# Altium footprint library FootPrintLib_1.PcbLib: 498 footprints (part 26 of 35)
Each footprint in its own frame and in the unit in brackets; x right, y up, seen from the top. Pads: shape width x height; smd on the part's side, far side on the other; paste and mask are expansions set on the pad; w line width, h text height; cw(c..) or ccw(c..) is an arc to the next point about the centre after c.
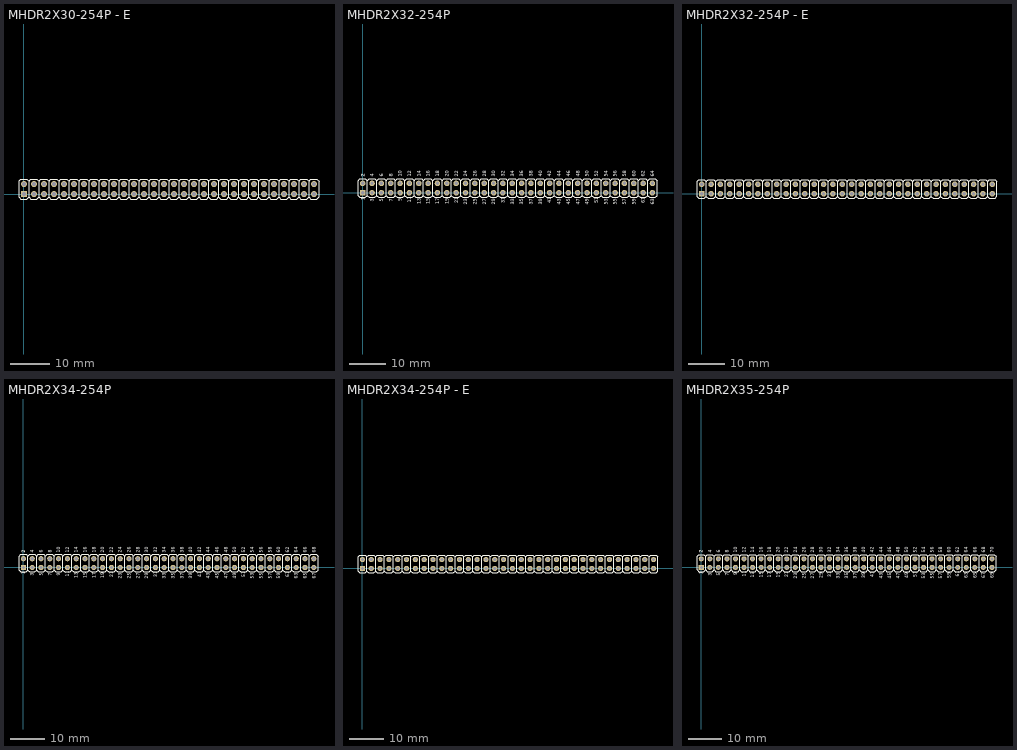
[diagram p25: the footprints below, top view; thin cyan lines are the x and y axes]

## MHDR2X30-254P - E [mm] "Male Header 2X30 with 2.54 mm Pitch"
pads (60):
  rect 1.5x1.5 hole 0.9: 1(0,0)
  round 1.5 hole 0.9: 2(0,2.54) 3(2.54,0) 4(2.54,2.54) 5(5.08,0) 6(5.08,2.54) 7(7.62,0) 8(7.62,2.54) 9(10.16,0) 10(10.16,2.54) 11(12.7,0) 12(12.7,2.54) 13(15.24,0) 14(15.24,2.54) 15(17.78,0) 16(17.78,2.54) 17(20.32,0) 18(20.32,2.54) 19(22.86,0) 20(22.86,2.54) 21(25.4,0) 22(25.4,2.54) 23(27.94,0) 24(27.94,2.54) 25(30.48,0) 26(30.48,2.54) 27(33.02,0) 28(33.02,2.54) 29(35.56,0) 30(35.56,2.54) 31(38.1,0) 32(38.1,2.54) 33(40.64,0) 34(40.64,2.54) 35(43.18,0) 36(43.18,2.54) 37(45.72,0) 38(45.72,2.54) 39(48.26,0) 40(48.26,2.54) 41(50.8,0) 42(50.8,2.54) 43(53.34,0) 44(53.34,2.54) 45(55.88,0) 46(55.88,2.54) 47(58.42,0) 48(58.42,2.54) 49(60.96,0) 50(60.96,2.54) 51(63.5,0) 52(63.5,2.54) 53(66.04,0) 54(66.04,2.54) 55(68.58,0) 56(68.58,2.54) 57(71.12,0) 58(71.12,2.54) 59(73.66,0) 60(73.66,2.54)
Top Overlay:
  drawing of 211 lines, arcs and shapes, not listed
3D body "PIN.STEP": height 8.43, standoff -2.49, extent 72.39,-1.27 74.93,1.27
3D body "PIN.STEP": height 8.43, standoff -2.49, extent 72.39,1.27 74.93,3.81
3D body "PIN.STEP": height 8.43, standoff -2.49, extent -1.27,1.27 1.27,3.81
3D body "PIN_mid.STEP": height 8.43, standoff -2.49, extent 69.85,-1.27 72.39,1.27
3D body "PIN_mid.STEP": height 8.43, standoff -2.49, extent 67.31,-1.27 69.85,1.27
3D body "PIN_mid.STEP": height 8.43, standoff -2.49, extent 64.77,-1.27 67.31,1.27
3D body "PIN_mid.STEP": height 8.43, standoff -2.49, extent 62.23,-1.27 64.77,1.27
3D body "PIN_mid.STEP": height 8.43, standoff -2.49, extent 59.69,-1.27 62.23,1.27
3D body "PIN_mid.STEP": height 8.43, standoff -2.49, extent 57.15,-1.27 59.69,1.27
3D body "PIN_mid.STEP": height 8.43, standoff -2.49, extent 54.61,-1.27 57.15,1.27
3D body "PIN_mid.STEP": height 8.43, standoff -2.49, extent 52.07,-1.27 54.61,1.27
3D body "PIN_mid.STEP": height 8.43, standoff -2.49, extent 49.53,-1.27 52.07,1.27
3D body "PIN_mid.STEP": height 8.43, standoff -2.49, extent 46.99,-1.27 49.53,1.27
3D body "PIN_mid.STEP": height 8.43, standoff -2.49, extent 44.45,-1.27 46.99,1.27
3D body "PIN_mid.STEP": height 8.43, standoff -2.49, extent 41.91,-1.27 44.45,1.27
3D body "PIN_mid.STEP": height 8.43, standoff -2.49, extent 39.37,-1.27 41.91,1.27
3D body "PIN_mid.STEP": height 8.43, standoff -2.49, extent 36.83,-1.27 39.37,1.27
3D body "PIN_mid.STEP": height 8.43, standoff -2.49, extent 34.29,-1.27 36.83,1.27
3D body "PIN_mid.STEP": height 8.43, standoff -2.49, extent 31.75,-1.27 34.29,1.27
3D body "PIN_mid.STEP": height 8.43, standoff -2.49, extent 29.21,-1.27 31.75,1.27
3D body "PIN_mid.STEP": height 8.43, standoff -2.49, extent 26.67,-1.27 29.21,1.27
3D body "PIN_mid.STEP": height 8.43, standoff -2.49, extent 24.13,-1.27 26.67,1.27
3D body "PIN_mid.STEP": height 8.43, standoff -2.49, extent 21.59,-1.27 24.13,1.27
3D body "PIN_mid.STEP": height 8.43, standoff -2.49, extent 19.05,-1.27 21.59,1.27
3D body "PIN_mid.STEP": height 8.43, standoff -2.49, extent 16.51,-1.27 19.05,1.27
3D body "PIN_mid.STEP": height 8.43, standoff -2.49, extent 13.97,-1.27 16.51,1.27
3D body "PIN_mid.STEP": height 8.43, standoff -2.49, extent 11.43,-1.27 13.97,1.27
3D body "PIN_mid.STEP": height 8.43, standoff -2.49, extent 8.89,-1.27 11.43,1.27
3D body "PIN_mid.STEP": height 8.43, standoff -2.49, extent 6.35,-1.27 8.89,1.27
3D body "PIN_mid.STEP": height 8.43, standoff -2.49, extent 3.81,-1.27 6.35,1.27
3D body "PIN_mid.STEP": height 8.43, standoff -2.49, extent 1.27,-1.27 3.81,1.27
3D body "PIN_mid.STEP": height 8.43, standoff -2.49, extent 1.27,1.27 3.81,3.81
3D body "PIN_mid.STEP": height 8.43, standoff -2.49, extent 69.85,1.27 72.39,3.81
3D body "PIN_mid.STEP": height 8.43, standoff -2.49, extent 67.31,1.27 69.85,3.81
3D body "PIN_mid.STEP": height 8.43, standoff -2.49, extent 64.77,1.27 67.31,3.81
3D body "PIN_mid.STEP": height 8.43, standoff -2.49, extent 62.23,1.27 64.77,3.81
3D body "PIN_mid.STEP": height 8.43, standoff -2.49, extent 59.69,1.27 62.23,3.81
3D body "PIN_mid.STEP": height 8.43, standoff -2.49, extent 57.15,1.27 59.69,3.81
3D body "PIN_mid.STEP": height 8.43, standoff -2.49, extent 54.61,1.27 57.15,3.81
3D body "PIN_mid.STEP": height 8.43, standoff -2.49, extent 52.07,1.27 54.61,3.81
3D body "PIN_mid.STEP": height 8.43, standoff -2.49, extent 49.53,1.27 52.07,3.81
3D body "PIN_mid.STEP": height 8.43, standoff -2.49, extent 46.99,1.27 49.53,3.81
3D body "PIN_mid.STEP": height 8.43, standoff -2.49, extent 44.45,1.27 46.99,3.81
3D body "PIN_mid.STEP": height 8.43, standoff -2.49, extent 41.91,1.27 44.45,3.81
3D body "PIN_mid.STEP": height 8.43, standoff -2.49, extent 39.37,1.27 41.91,3.81
3D body "PIN_mid.STEP": height 8.43, standoff -2.49, extent 36.83,1.27 39.37,3.81
3D body "PIN_mid.STEP": height 8.43, standoff -2.49, extent 34.29,1.27 36.83,3.81
3D body "PIN_mid.STEP": height 8.43, standoff -2.49, extent 31.75,1.27 34.29,3.81
3D body "PIN_mid.STEP": height 8.43, standoff -2.49, extent 29.21,1.27 31.75,3.81
3D body "PIN_mid.STEP": height 8.43, standoff -2.49, extent 26.67,1.27 29.21,3.81
3D body "PIN_mid.STEP": height 8.43, standoff -2.49, extent 24.13,1.27 26.67,3.81
3D body "PIN_mid.STEP": height 8.43, standoff -2.49, extent 21.59,1.27 24.13,3.81
3D body "PIN_mid.STEP": height 8.43, standoff -2.49, extent 19.05,1.27 21.59,3.81
3D body "PIN_mid.STEP": height 8.43, standoff -2.49, extent 16.51,1.27 19.05,3.81
3D body "PIN_mid.STEP": height 8.43, standoff -2.49, extent 13.97,1.27 16.51,3.81
3D body "PIN_mid.STEP": height 8.43, standoff -2.49, extent 11.43,1.27 13.97,3.81
3D body "PIN_mid.STEP": height 8.43, standoff -2.49, extent 8.89,1.27 11.43,3.81
3D body "PIN_mid.STEP": height 8.43, standoff -2.49, extent 6.35,1.27 8.89,3.81
3D body "PIN_mid.STEP": height 8.43, standoff -2.49, extent 3.81,1.27 6.35,3.81
3D body "PIN.STEP": height 8.43, standoff -2.49, extent -1.27,-1.27 1.27,1.27

## MHDR2X32-254P [mm] "Male Header 2X32 with 2.54 mm Pitch"
pads (64):
  rect 1.5x1.5 hole 0.9: 1(0,0)
  round 1.5 hole 0.9: 2(0,2.54) 3(2.54,0) 4(2.54,2.54) 5(5.08,0) 6(5.08,2.54) 7(7.62,0) 8(7.62,2.54) 9(10.16,0) 10(10.16,2.54) 11(12.7,0) 12(12.7,2.54) 13(15.24,0) 14(15.24,2.54) 15(17.78,0) 16(17.78,2.54) 17(20.32,0) 18(20.32,2.54) 19(22.86,0) 20(22.86,2.54) 21(25.4,0) 22(25.4,2.54) 23(27.94,0) 24(27.94,2.54) 25(30.48,0) 26(30.48,2.54) 27(33.02,0) 28(33.02,2.54) 29(35.56,0) 30(35.56,2.54) 31(38.1,0) 32(38.1,2.54) 33(40.64,0) 34(40.64,2.54) 35(43.18,0) 36(43.18,2.54) 37(45.72,0) 38(45.72,2.54) 39(48.26,0) 40(48.26,2.54) 41(50.8,0) 42(50.8,2.54) 43(53.34,0) 44(53.34,2.54) 45(55.88,0) 46(55.88,2.54) 47(58.42,0) 48(58.42,2.54) 49(60.96,0) 50(60.96,2.54) 51(63.5,0) 52(63.5,2.54) 53(66.04,0) 54(66.04,2.54) 55(68.58,0) 56(68.58,2.54) 57(71.12,0) 58(71.12,2.54) 59(73.66,0) 60(73.66,2.54) 61(76.2,0) 62(76.2,2.54) 63(78.74,0) 64(78.74,2.54)
Top Overlay:
  drawing of 225 lines, arcs and shapes, not listed
  text "63" at 79.248,-3.25 h1
  text "64" at 79.248,4.318 h1
  text "61" at 76.708,-2.821 h1
  text "62" at 76.708,4.318 h1
  text "59" at 74.168,-3.254 h1
  text "60" at 74.168,4.318 h1
  text "57" at 71.628,-3.302 h1
  text "58" at 71.628,4.318 h1
  text "55" at 69.088,-3.302 h1
  text "56" at 69.088,4.318 h1
  text "53" at 66.548,-3.302 h1
  text "54" at 66.548,4.318 h1
  text "51" at 64.008,-2.874 h1
  text "52" at 64.008,4.318 h1
  text "49" at 61.468,-3.254 h1
  text "50" at 61.468,4.318 h1
  text "47" at 58.928,-3.302 h1
  text "48" at 58.928,4.318 h1
  text "45" at 56.388,-3.302 h1
  text "46" at 56.388,4.318 h1
  text "43" at 53.848,-3.302 h1
  text "44" at 53.848,4.318 h1
  text "41" at 51.308,-2.874 h1
  text "42" at 51.308,4.318 h1
  text "39" at 48.768,-3.254 h1
  text "40" at 48.768,4.318 h1
  text "37" at 46.228,-3.302 h1
  text "38" at 46.228,4.318 h1
  text "35" at 43.688,-3.302 h1
  text "36" at 43.688,4.318 h1
  text "33" at 41.148,-3.302 h1
  text "34" at 41.148,4.318 h1
  text "31" at 38.608,-2.874 h1
  text "32" at 38.608,4.318 h1
  text "29" at 36.068,-3.254 h1
  text "30" at 36.068,4.318 h1
  text "27" at 33.528,-3.302 h1
  text "28" at 33.528,4.318 h1
  text "25" at 30.988,-3.302 h1
  text "26" at 30.988,4.318 h1
  text "23" at 28.448,-3.302 h1
  text "24" at 28.448,4.318 h1
  text "21" at 25.908,-2.874 h1
  text "22" at 25.908,4.318 h1
  text "19" at 23.368,-3.097 h1
  text "20" at 23.368,4.318 h1
  text "17" at 20.828,-3.145 h1
  text "18" at 20.828,4.318 h1
  text "15" at 18.288,-3.145 h1
  text "16" at 18.288,4.318 h1
  text "13" at 15.748,-3.145 h1
  text "14" at 15.748,4.318 h1
  text "11" at 13.208,-2.716 h1
  text "12" at 13.208,4.318 h1
  text "9" at 10.668,-2.364 h1
  text "10" at 10.668,4.318 h1
  text "7" at 8.128,-2.412 h1
  text "8" at 8.128,4.318 h1
  text "5" at 5.588,-2.412 h1
  text "6" at 5.588,4.318 h1
  text "3" at 3.048,-2.412 h1
  text "4" at 3.048,4.318 h1
  text "1" at 0.508,-1.983 h1
  text "2" at 0.508,4.318 h1
  text "2" at 0.508,4.318 h1
  text "1" at 0.508,-1.983 h1
3D body "PIN.STEP": height 8.43, standoff -2.49, extent 77.47,-1.27 80.01,1.27
3D body "PIN.STEP": height 8.43, standoff -2.49, extent 77.47,1.27 80.01,3.81
3D body "PIN.STEP": height 8.43, standoff -2.49, extent -1.27,1.27 1.27,3.81
3D body "PIN_mid.STEP": height 8.43, standoff -2.49, extent 74.93,-1.27 77.47,1.27
3D body "PIN_mid.STEP": height 8.43, standoff -2.49, extent 72.39,-1.27 74.93,1.27
3D body "PIN_mid.STEP": height 8.43, standoff -2.49, extent 69.85,-1.27 72.39,1.27
3D body "PIN_mid.STEP": height 8.43, standoff -2.49, extent 67.31,-1.27 69.85,1.27
3D body "PIN_mid.STEP": height 8.43, standoff -2.49, extent 64.77,-1.27 67.31,1.27
3D body "PIN_mid.STEP": height 8.43, standoff -2.49, extent 62.23,-1.27 64.77,1.27
3D body "PIN_mid.STEP": height 8.43, standoff -2.49, extent 59.69,-1.27 62.23,1.27
3D body "PIN_mid.STEP": height 8.43, standoff -2.49, extent 57.15,-1.27 59.69,1.27
3D body "PIN_mid.STEP": height 8.43, standoff -2.49, extent 54.61,-1.27 57.15,1.27
3D body "PIN_mid.STEP": height 8.43, standoff -2.49, extent 52.07,-1.27 54.61,1.27
3D body "PIN_mid.STEP": height 8.43, standoff -2.49, extent 49.53,-1.27 52.07,1.27
3D body "PIN_mid.STEP": height 8.43, standoff -2.49, extent 46.99,-1.27 49.53,1.27
3D body "PIN_mid.STEP": height 8.43, standoff -2.49, extent 44.45,-1.27 46.99,1.27
3D body "PIN_mid.STEP": height 8.43, standoff -2.49, extent 41.91,-1.27 44.45,1.27
3D body "PIN_mid.STEP": height 8.43, standoff -2.49, extent 39.37,-1.27 41.91,1.27
3D body "PIN_mid.STEP": height 8.43, standoff -2.49, extent 36.83,-1.27 39.37,1.27
3D body "PIN_mid.STEP": height 8.43, standoff -2.49, extent 34.29,-1.27 36.83,1.27
3D body "PIN_mid.STEP": height 8.43, standoff -2.49, extent 31.75,-1.27 34.29,1.27
3D body "PIN_mid.STEP": height 8.43, standoff -2.49, extent 29.21,-1.27 31.75,1.27
3D body "PIN_mid.STEP": height 8.43, standoff -2.49, extent 26.67,-1.27 29.21,1.27
3D body "PIN_mid.STEP": height 8.43, standoff -2.49, extent 24.13,-1.27 26.67,1.27
3D body "PIN_mid.STEP": height 8.43, standoff -2.49, extent 21.59,-1.27 24.13,1.27
3D body "PIN_mid.STEP": height 8.43, standoff -2.49, extent 19.05,-1.27 21.59,1.27
3D body "PIN_mid.STEP": height 8.43, standoff -2.49, extent 16.51,-1.27 19.05,1.27
3D body "PIN_mid.STEP": height 8.43, standoff -2.49, extent 13.97,-1.27 16.51,1.27
3D body "PIN_mid.STEP": height 8.43, standoff -2.49, extent 11.43,-1.27 13.97,1.27
3D body "PIN_mid.STEP": height 8.43, standoff -2.49, extent 8.89,-1.27 11.43,1.27
3D body "PIN_mid.STEP": height 8.43, standoff -2.49, extent 6.35,-1.27 8.89,1.27
3D body "PIN_mid.STEP": height 8.43, standoff -2.49, extent 3.81,-1.27 6.35,1.27
3D body "PIN_mid.STEP": height 8.43, standoff -2.49, extent 1.27,-1.27 3.81,1.27
3D body "PIN_mid.STEP": height 8.43, standoff -2.49, extent 1.27,1.27 3.81,3.81
3D body "PIN_mid.STEP": height 8.43, standoff -2.49, extent 74.93,1.27 77.47,3.81
3D body "PIN_mid.STEP": height 8.43, standoff -2.49, extent 72.39,1.27 74.93,3.81
3D body "PIN_mid.STEP": height 8.43, standoff -2.49, extent 69.85,1.27 72.39,3.81
3D body "PIN_mid.STEP": height 8.43, standoff -2.49, extent 67.31,1.27 69.85,3.81
3D body "PIN_mid.STEP": height 8.43, standoff -2.49, extent 64.77,1.27 67.31,3.81
3D body "PIN_mid.STEP": height 8.43, standoff -2.49, extent 62.23,1.27 64.77,3.81
3D body "PIN_mid.STEP": height 8.43, standoff -2.49, extent 59.69,1.27 62.23,3.81
3D body "PIN_mid.STEP": height 8.43, standoff -2.49, extent 57.15,1.27 59.69,3.81
3D body "PIN_mid.STEP": height 8.43, standoff -2.49, extent 54.61,1.27 57.15,3.81
3D body "PIN_mid.STEP": height 8.43, standoff -2.49, extent 52.07,1.27 54.61,3.81
3D body "PIN_mid.STEP": height 8.43, standoff -2.49, extent 49.53,1.27 52.07,3.81
3D body "PIN_mid.STEP": height 8.43, standoff -2.49, extent 46.99,1.27 49.53,3.81
3D body "PIN_mid.STEP": height 8.43, standoff -2.49, extent 44.45,1.27 46.99,3.81
3D body "PIN_mid.STEP": height 8.43, standoff -2.49, extent 41.91,1.27 44.45,3.81
3D body "PIN_mid.STEP": height 8.43, standoff -2.49, extent 39.37,1.27 41.91,3.81
3D body "PIN_mid.STEP": height 8.43, standoff -2.49, extent 36.83,1.27 39.37,3.81
3D body "PIN_mid.STEP": height 8.43, standoff -2.49, extent 34.29,1.27 36.83,3.81
3D body "PIN_mid.STEP": height 8.43, standoff -2.49, extent 31.75,1.27 34.29,3.81
3D body "PIN_mid.STEP": height 8.43, standoff -2.49, extent 29.21,1.27 31.75,3.81
3D body "PIN_mid.STEP": height 8.43, standoff -2.49, extent 26.67,1.27 29.21,3.81
3D body "PIN_mid.STEP": height 8.43, standoff -2.49, extent 24.13,1.27 26.67,3.81
3D body "PIN_mid.STEP": height 8.43, standoff -2.49, extent 21.59,1.27 24.13,3.81
3D body "PIN_mid.STEP": height 8.43, standoff -2.49, extent 19.05,1.27 21.59,3.81
3D body "PIN_mid.STEP": height 8.43, standoff -2.49, extent 16.51,1.27 19.05,3.81
3D body "PIN_mid.STEP": height 8.43, standoff -2.49, extent 13.97,1.27 16.51,3.81
3D body "PIN_mid.STEP": height 8.43, standoff -2.49, extent 11.43,1.27 13.97,3.81
3D body "PIN_mid.STEP": height 8.43, standoff -2.49, extent 8.89,1.27 11.43,3.81
3D body "PIN_mid.STEP": height 8.43, standoff -2.49, extent 6.35,1.27 8.89,3.81
3D body "PIN_mid.STEP": height 8.43, standoff -2.49, extent 3.81,1.27 6.35,3.81
3D body "PIN.STEP": height 8.43, standoff -2.49, extent -1.27,-1.27 1.27,1.27

## MHDR2X32-254P - E [mm] "Male Header 2X32 with 2.54 mm Pitch"
pads (64):
  rect 1.5x1.5 hole 0.9: 1(0,0)
  round 1.5 hole 0.9: 2(0,2.54) 3(2.54,0) 4(2.54,2.54) 5(5.08,0) 6(5.08,2.54) 7(7.62,0) 8(7.62,2.54) 9(10.16,0) 10(10.16,2.54) 11(12.7,0) 12(12.7,2.54) 13(15.24,0) 14(15.24,2.54) 15(17.78,0) 16(17.78,2.54) 17(20.32,0) 18(20.32,2.54) 19(22.86,0) 20(22.86,2.54) 21(25.4,0) 22(25.4,2.54) 23(27.94,0) 24(27.94,2.54) 25(30.48,0) 26(30.48,2.54) 27(33.02,0) 28(33.02,2.54) 29(35.56,0) 30(35.56,2.54) 31(38.1,0) 32(38.1,2.54) 33(40.64,0) 34(40.64,2.54) 35(43.18,0) 36(43.18,2.54) 37(45.72,0) 38(45.72,2.54) 39(48.26,0) 40(48.26,2.54) 41(50.8,0) 42(50.8,2.54) 43(53.34,0) 44(53.34,2.54) 45(55.88,0) 46(55.88,2.54) 47(58.42,0) 48(58.42,2.54) 49(60.96,0) 50(60.96,2.54) 51(63.5,0) 52(63.5,2.54) 53(66.04,0) 54(66.04,2.54) 55(68.58,0) 56(68.58,2.54) 57(71.12,0) 58(71.12,2.54) 59(73.66,0) 60(73.66,2.54) 61(76.2,0) 62(76.2,2.54) 63(78.74,0) 64(78.74,2.54)
Top Overlay:
  drawing of 225 lines, arcs and shapes, not listed
3D body "PIN.STEP": height 8.43, standoff -2.49, extent -1.27,-1.27 1.27,1.27
3D body "PIN_mid.STEP": height 8.43, standoff -2.49, extent 3.81,1.27 6.35,3.81
3D body "PIN_mid.STEP": height 8.43, standoff -2.49, extent 6.35,1.27 8.89,3.81
3D body "PIN_mid.STEP": height 8.43, standoff -2.49, extent 8.89,1.27 11.43,3.81
3D body "PIN_mid.STEP": height 8.43, standoff -2.49, extent 11.43,1.27 13.97,3.81
3D body "PIN_mid.STEP": height 8.43, standoff -2.49, extent 13.97,1.27 16.51,3.81
3D body "PIN_mid.STEP": height 8.43, standoff -2.49, extent 16.51,1.27 19.05,3.81
3D body "PIN_mid.STEP": height 8.43, standoff -2.49, extent 19.05,1.27 21.59,3.81
3D body "PIN_mid.STEP": height 8.43, standoff -2.49, extent 21.59,1.27 24.13,3.81
3D body "PIN_mid.STEP": height 8.43, standoff -2.49, extent 24.13,1.27 26.67,3.81
3D body "PIN_mid.STEP": height 8.43, standoff -2.49, extent 26.67,1.27 29.21,3.81
3D body "PIN_mid.STEP": height 8.43, standoff -2.49, extent 29.21,1.27 31.75,3.81
3D body "PIN_mid.STEP": height 8.43, standoff -2.49, extent 31.75,1.27 34.29,3.81
3D body "PIN_mid.STEP": height 8.43, standoff -2.49, extent 34.29,1.27 36.83,3.81
3D body "PIN_mid.STEP": height 8.43, standoff -2.49, extent 36.83,1.27 39.37,3.81
3D body "PIN_mid.STEP": height 8.43, standoff -2.49, extent 39.37,1.27 41.91,3.81
3D body "PIN_mid.STEP": height 8.43, standoff -2.49, extent 41.91,1.27 44.45,3.81
3D body "PIN_mid.STEP": height 8.43, standoff -2.49, extent 44.45,1.27 46.99,3.81
3D body "PIN_mid.STEP": height 8.43, standoff -2.49, extent 46.99,1.27 49.53,3.81
3D body "PIN_mid.STEP": height 8.43, standoff -2.49, extent 49.53,1.27 52.07,3.81
3D body "PIN_mid.STEP": height 8.43, standoff -2.49, extent 52.07,1.27 54.61,3.81
3D body "PIN_mid.STEP": height 8.43, standoff -2.49, extent 54.61,1.27 57.15,3.81
3D body "PIN_mid.STEP": height 8.43, standoff -2.49, extent 57.15,1.27 59.69,3.81
3D body "PIN_mid.STEP": height 8.43, standoff -2.49, extent 59.69,1.27 62.23,3.81
3D body "PIN_mid.STEP": height 8.43, standoff -2.49, extent 62.23,1.27 64.77,3.81
3D body "PIN_mid.STEP": height 8.43, standoff -2.49, extent 64.77,1.27 67.31,3.81
3D body "PIN_mid.STEP": height 8.43, standoff -2.49, extent 67.31,1.27 69.85,3.81
3D body "PIN_mid.STEP": height 8.43, standoff -2.49, extent 69.85,1.27 72.39,3.81
3D body "PIN_mid.STEP": height 8.43, standoff -2.49, extent 72.39,1.27 74.93,3.81
3D body "PIN_mid.STEP": height 8.43, standoff -2.49, extent 74.93,1.27 77.47,3.81
3D body "PIN_mid.STEP": height 8.43, standoff -2.49, extent 1.27,1.27 3.81,3.81
3D body "PIN_mid.STEP": height 8.43, standoff -2.49, extent 1.27,-1.27 3.81,1.27
3D body "PIN_mid.STEP": height 8.43, standoff -2.49, extent 3.81,-1.27 6.35,1.27
3D body "PIN_mid.STEP": height 8.43, standoff -2.49, extent 6.35,-1.27 8.89,1.27
3D body "PIN_mid.STEP": height 8.43, standoff -2.49, extent 8.89,-1.27 11.43,1.27
3D body "PIN_mid.STEP": height 8.43, standoff -2.49, extent 11.43,-1.27 13.97,1.27
3D body "PIN_mid.STEP": height 8.43, standoff -2.49, extent 13.97,-1.27 16.51,1.27
3D body "PIN_mid.STEP": height 8.43, standoff -2.49, extent 16.51,-1.27 19.05,1.27
3D body "PIN_mid.STEP": height 8.43, standoff -2.49, extent 19.05,-1.27 21.59,1.27
3D body "PIN_mid.STEP": height 8.43, standoff -2.49, extent 21.59,-1.27 24.13,1.27
3D body "PIN_mid.STEP": height 8.43, standoff -2.49, extent 24.13,-1.27 26.67,1.27
3D body "PIN_mid.STEP": height 8.43, standoff -2.49, extent 26.67,-1.27 29.21,1.27
3D body "PIN_mid.STEP": height 8.43, standoff -2.49, extent 29.21,-1.27 31.75,1.27
3D body "PIN_mid.STEP": height 8.43, standoff -2.49, extent 31.75,-1.27 34.29,1.27
3D body "PIN_mid.STEP": height 8.43, standoff -2.49, extent 34.29,-1.27 36.83,1.27
3D body "PIN_mid.STEP": height 8.43, standoff -2.49, extent 36.83,-1.27 39.37,1.27
3D body "PIN_mid.STEP": height 8.43, standoff -2.49, extent 39.37,-1.27 41.91,1.27
3D body "PIN_mid.STEP": height 8.43, standoff -2.49, extent 41.91,-1.27 44.45,1.27
3D body "PIN_mid.STEP": height 8.43, standoff -2.49, extent 44.45,-1.27 46.99,1.27
3D body "PIN_mid.STEP": height 8.43, standoff -2.49, extent 46.99,-1.27 49.53,1.27
3D body "PIN_mid.STEP": height 8.43, standoff -2.49, extent 49.53,-1.27 52.07,1.27
3D body "PIN_mid.STEP": height 8.43, standoff -2.49, extent 52.07,-1.27 54.61,1.27
3D body "PIN_mid.STEP": height 8.43, standoff -2.49, extent 54.61,-1.27 57.15,1.27
3D body "PIN_mid.STEP": height 8.43, standoff -2.49, extent 57.15,-1.27 59.69,1.27
3D body "PIN_mid.STEP": height 8.43, standoff -2.49, extent 59.69,-1.27 62.23,1.27
3D body "PIN_mid.STEP": height 8.43, standoff -2.49, extent 62.23,-1.27 64.77,1.27
3D body "PIN_mid.STEP": height 8.43, standoff -2.49, extent 64.77,-1.27 67.31,1.27
3D body "PIN_mid.STEP": height 8.43, standoff -2.49, extent 67.31,-1.27 69.85,1.27
3D body "PIN_mid.STEP": height 8.43, standoff -2.49, extent 69.85,-1.27 72.39,1.27
3D body "PIN_mid.STEP": height 8.43, standoff -2.49, extent 72.39,-1.27 74.93,1.27
3D body "PIN_mid.STEP": height 8.43, standoff -2.49, extent 74.93,-1.27 77.47,1.27
3D body "PIN.STEP": height 8.43, standoff -2.49, extent -1.27,1.27 1.27,3.81
3D body "PIN.STEP": height 8.43, standoff -2.49, extent 77.47,1.27 80.01,3.81
3D body "PIN.STEP": height 8.43, standoff -2.49, extent 77.47,-1.27 80.01,1.27

## MHDR2X34-254P [mm] "Male Header 2X34 with 2.54 mm Pitch"
pads (68):
  rect 1.5x1.5 hole 0.9: 1(0,0)
  round 1.5 hole 0.9: 2(0,2.54) 3(2.54,0) 4(2.54,2.54) 5(5.08,0) 6(5.08,2.54) 7(7.62,0) 8(7.62,2.54) 9(10.16,0) 10(10.16,2.54) 11(12.7,0) 12(12.7,2.54) 13(15.24,0) 14(15.24,2.54) 15(17.78,0) 16(17.78,2.54) 17(20.32,0) 18(20.32,2.54) 19(22.86,0) 20(22.86,2.54) 21(25.4,0) 22(25.4,2.54) 23(27.94,0) 24(27.94,2.54) 25(30.48,0) 26(30.48,2.54) 27(33.02,0) 28(33.02,2.54) 29(35.56,0) 30(35.56,2.54) 31(38.1,0) 32(38.1,2.54) 33(40.64,0) 34(40.64,2.54) 35(43.18,0) 36(43.18,2.54) 37(45.72,0) 38(45.72,2.54) 39(48.26,0) 40(48.26,2.54) 41(50.8,0) 42(50.8,2.54) 43(53.34,0) 44(53.34,2.54) 45(55.88,0) 46(55.88,2.54) 47(58.42,0) 48(58.42,2.54) 49(60.96,0) 50(60.96,2.54) 51(63.5,0) 52(63.5,2.54) 53(66.04,0) 54(66.04,2.54) 55(68.58,0) 56(68.58,2.54) 57(71.12,0) 58(71.12,2.54) 59(73.66,0) 60(73.66,2.54) 61(76.2,0) 62(76.2,2.54) 63(78.74,0) 64(78.74,2.54) 65(81.28,0) 66(81.28,2.54) 67(83.82,0) 68(83.82,2.54)
Top Overlay:
  drawing of 239 lines, arcs and shapes, not listed
  text "1" at 0.508,-1.983 h1
  text "2" at 0.508,4.318 h1
  text "2" at 0.508,4.318 h1
  text "1" at 0.508,-1.983 h1
  text "4" at 3.048,4.318 h1
  text "3" at 3.048,-2.412 h1
  text "6" at 5.588,4.318 h1
  text "5" at 5.588,-2.412 h1
  text "8" at 8.128,4.318 h1
  text "7" at 8.128,-2.412 h1
  text "10" at 10.668,4.318 h1
  text "9" at 10.668,-2.364 h1
  text "12" at 13.208,4.318 h1
  text "11" at 13.208,-2.716 h1
  text "14" at 15.748,4.318 h1
  text "13" at 15.748,-3.145 h1
  text "16" at 18.288,4.318 h1
  text "15" at 18.288,-3.145 h1
  text "18" at 20.828,4.318 h1
  text "17" at 20.828,-3.145 h1
  text "20" at 23.368,4.318 h1
  text "19" at 23.368,-3.097 h1
  text "22" at 25.908,4.318 h1
  text "21" at 25.908,-2.874 h1
  text "24" at 28.448,4.318 h1
  text "23" at 28.448,-3.302 h1
  text "26" at 30.988,4.318 h1
  text "25" at 30.988,-3.302 h1
  text "28" at 33.528,4.318 h1
  text "27" at 33.528,-3.302 h1
  text "30" at 36.068,4.318 h1
  text "29" at 36.068,-3.254 h1
  text "32" at 38.608,4.318 h1
  text "31" at 38.608,-2.874 h1
  text "34" at 41.148,4.318 h1
  text "33" at 41.148,-3.302 h1
  text "36" at 43.688,4.318 h1
  text "35" at 43.688,-3.302 h1
  text "38" at 46.228,4.318 h1
  text "37" at 46.228,-3.302 h1
  text "40" at 48.768,4.318 h1
  text "39" at 48.768,-3.254 h1
  text "42" at 51.308,4.318 h1
  text "41" at 51.308,-2.874 h1
  text "44" at 53.848,4.318 h1
  text "43" at 53.848,-3.302 h1
  text "46" at 56.388,4.318 h1
  text "45" at 56.388,-3.302 h1
  text "48" at 58.928,4.318 h1
  text "47" at 58.928,-3.302 h1
  text "50" at 61.468,4.318 h1
  text "49" at 61.468,-3.254 h1
  text "52" at 64.008,4.318 h1
  text "51" at 64.008,-2.874 h1
  text "54" at 66.548,4.318 h1
  text "53" at 66.548,-3.302 h1
  text "56" at 69.088,4.318 h1
  text "55" at 69.088,-3.302 h1
  text "58" at 71.628,4.318 h1
  text "57" at 71.628,-3.302 h1
  text "60" at 74.168,4.318 h1
  text "59" at 74.168,-3.254 h1
  text "62" at 76.708,4.318 h1
  text "61" at 76.708,-2.821 h1
  text "64" at 79.248,4.318 h1
  text "63" at 79.248,-3.25 h1
  text "66" at 81.788,4.318 h1
  text "65" at 81.788,-3.25 h1
  text "68" at 84.328,4.318 h1
  text "67" at 84.328,-3.25 h1
3D body "PIN.STEP": height 8.43, standoff -2.49, extent 82.55,-1.27 85.09,1.27
3D body "PIN.STEP": height 8.43, standoff -2.49, extent 82.55,1.27 85.09,3.81
3D body "PIN.STEP": height 8.43, standoff -2.49, extent -1.27,1.27 1.27,3.81
3D body "PIN_mid.STEP": height 8.43, standoff -2.49, extent 80.01,-1.27 82.55,1.27
3D body "PIN_mid.STEP": height 8.43, standoff -2.49, extent 77.47,-1.27 80.01,1.27
3D body "PIN_mid.STEP": height 8.43, standoff -2.49, extent 74.93,-1.27 77.47,1.27
3D body "PIN_mid.STEP": height 8.43, standoff -2.49, extent 72.39,-1.27 74.93,1.27
3D body "PIN_mid.STEP": height 8.43, standoff -2.49, extent 69.85,-1.27 72.39,1.27
3D body "PIN_mid.STEP": height 8.43, standoff -2.49, extent 67.31,-1.27 69.85,1.27
3D body "PIN_mid.STEP": height 8.43, standoff -2.49, extent 64.77,-1.27 67.31,1.27
3D body "PIN_mid.STEP": height 8.43, standoff -2.49, extent 62.23,-1.27 64.77,1.27
3D body "PIN_mid.STEP": height 8.43, standoff -2.49, extent 59.69,-1.27 62.23,1.27
3D body "PIN_mid.STEP": height 8.43, standoff -2.49, extent 57.15,-1.27 59.69,1.27
3D body "PIN_mid.STEP": height 8.43, standoff -2.49, extent 54.61,-1.27 57.15,1.27
3D body "PIN_mid.STEP": height 8.43, standoff -2.49, extent 52.07,-1.27 54.61,1.27
3D body "PIN_mid.STEP": height 8.43, standoff -2.49, extent 49.53,-1.27 52.07,1.27
3D body "PIN_mid.STEP": height 8.43, standoff -2.49, extent 46.99,-1.27 49.53,1.27
3D body "PIN_mid.STEP": height 8.43, standoff -2.49, extent 44.45,-1.27 46.99,1.27
3D body "PIN_mid.STEP": height 8.43, standoff -2.49, extent 41.91,-1.27 44.45,1.27
3D body "PIN_mid.STEP": height 8.43, standoff -2.49, extent 39.37,-1.27 41.91,1.27
3D body "PIN_mid.STEP": height 8.43, standoff -2.49, extent 36.83,-1.27 39.37,1.27
3D body "PIN_mid.STEP": height 8.43, standoff -2.49, extent 34.29,-1.27 36.83,1.27
3D body "PIN_mid.STEP": height 8.43, standoff -2.49, extent 31.75,-1.27 34.29,1.27
3D body "PIN_mid.STEP": height 8.43, standoff -2.49, extent 29.21,-1.27 31.75,1.27
3D body "PIN_mid.STEP": height 8.43, standoff -2.49, extent 26.67,-1.27 29.21,1.27
3D body "PIN_mid.STEP": height 8.43, standoff -2.49, extent 24.13,-1.27 26.67,1.27
3D body "PIN_mid.STEP": height 8.43, standoff -2.49, extent 21.59,-1.27 24.13,1.27
3D body "PIN_mid.STEP": height 8.43, standoff -2.49, extent 19.05,-1.27 21.59,1.27
3D body "PIN_mid.STEP": height 8.43, standoff -2.49, extent 16.51,-1.27 19.05,1.27
3D body "PIN_mid.STEP": height 8.43, standoff -2.49, extent 13.97,-1.27 16.51,1.27
3D body "PIN_mid.STEP": height 8.43, standoff -2.49, extent 11.43,-1.27 13.97,1.27
3D body "PIN_mid.STEP": height 8.43, standoff -2.49, extent 8.89,-1.27 11.43,1.27
3D body "PIN_mid.STEP": height 8.43, standoff -2.49, extent 6.35,-1.27 8.89,1.27
3D body "PIN_mid.STEP": height 8.43, standoff -2.49, extent 3.81,-1.27 6.35,1.27
3D body "PIN_mid.STEP": height 8.43, standoff -2.49, extent 1.27,-1.27 3.81,1.27
3D body "PIN_mid.STEP": height 8.43, standoff -2.49, extent 1.27,1.27 3.81,3.81
3D body "PIN_mid.STEP": height 8.43, standoff -2.49, extent 80.01,1.27 82.55,3.81
3D body "PIN_mid.STEP": height 8.43, standoff -2.49, extent 77.47,1.27 80.01,3.81
3D body "PIN_mid.STEP": height 8.43, standoff -2.49, extent 74.93,1.27 77.47,3.81
3D body "PIN_mid.STEP": height 8.43, standoff -2.49, extent 72.39,1.27 74.93,3.81
3D body "PIN_mid.STEP": height 8.43, standoff -2.49, extent 69.85,1.27 72.39,3.81
3D body "PIN_mid.STEP": height 8.43, standoff -2.49, extent 67.31,1.27 69.85,3.81
3D body "PIN_mid.STEP": height 8.43, standoff -2.49, extent 64.77,1.27 67.31,3.81
3D body "PIN_mid.STEP": height 8.43, standoff -2.49, extent 62.23,1.27 64.77,3.81
3D body "PIN_mid.STEP": height 8.43, standoff -2.49, extent 59.69,1.27 62.23,3.81
3D body "PIN_mid.STEP": height 8.43, standoff -2.49, extent 57.15,1.27 59.69,3.81
3D body "PIN_mid.STEP": height 8.43, standoff -2.49, extent 54.61,1.27 57.15,3.81
3D body "PIN_mid.STEP": height 8.43, standoff -2.49, extent 52.07,1.27 54.61,3.81
3D body "PIN_mid.STEP": height 8.43, standoff -2.49, extent 49.53,1.27 52.07,3.81
3D body "PIN_mid.STEP": height 8.43, standoff -2.49, extent 46.99,1.27 49.53,3.81
3D body "PIN_mid.STEP": height 8.43, standoff -2.49, extent 44.45,1.27 46.99,3.81
3D body "PIN_mid.STEP": height 8.43, standoff -2.49, extent 41.91,1.27 44.45,3.81
3D body "PIN_mid.STEP": height 8.43, standoff -2.49, extent 39.37,1.27 41.91,3.81
3D body "PIN_mid.STEP": height 8.43, standoff -2.49, extent 36.83,1.27 39.37,3.81
3D body "PIN_mid.STEP": height 8.43, standoff -2.49, extent 34.29,1.27 36.83,3.81
3D body "PIN_mid.STEP": height 8.43, standoff -2.49, extent 31.75,1.27 34.29,3.81
3D body "PIN_mid.STEP": height 8.43, standoff -2.49, extent 29.21,1.27 31.75,3.81
3D body "PIN_mid.STEP": height 8.43, standoff -2.49, extent 26.67,1.27 29.21,3.81
3D body "PIN_mid.STEP": height 8.43, standoff -2.49, extent 24.13,1.27 26.67,3.81
3D body "PIN_mid.STEP": height 8.43, standoff -2.49, extent 21.59,1.27 24.13,3.81
3D body "PIN_mid.STEP": height 8.43, standoff -2.49, extent 19.05,1.27 21.59,3.81
3D body "PIN_mid.STEP": height 8.43, standoff -2.49, extent 16.51,1.27 19.05,3.81
3D body "PIN_mid.STEP": height 8.43, standoff -2.49, extent 13.97,1.27 16.51,3.81
3D body "PIN_mid.STEP": height 8.43, standoff -2.49, extent 11.43,1.27 13.97,3.81
3D body "PIN_mid.STEP": height 8.43, standoff -2.49, extent 8.89,1.27 11.43,3.81
3D body "PIN_mid.STEP": height 8.43, standoff -2.49, extent 6.35,1.27 8.89,3.81
3D body "PIN_mid.STEP": height 8.43, standoff -2.49, extent 3.81,1.27 6.35,3.81
3D body "PIN.STEP": height 8.43, standoff -2.49, extent -1.27,-1.27 1.27,1.27

## MHDR2X34-254P - E [mm] "Male Header 2X34 with 2.54 mm Pitch"
pads (68):
  rect 1.5x1.5 hole 0.9: 1(0,0)
  round 1.5 hole 0.9: 2(0,2.54) 3(2.54,0) 4(2.54,2.54) 5(5.08,0) 6(5.08,2.54) 7(7.62,0) 8(7.62,2.54) 9(10.16,0) 10(10.16,2.54) 11(12.7,0) 12(12.7,2.54) 13(15.24,0) 14(15.24,2.54) 15(17.78,0) 16(17.78,2.54) 17(20.32,0) 18(20.32,2.54) 19(22.86,0) 20(22.86,2.54) 21(25.4,0) 22(25.4,2.54) 23(27.94,0) 24(27.94,2.54) 25(30.48,0) 26(30.48,2.54) 27(33.02,0) 28(33.02,2.54) 29(35.56,0) 30(35.56,2.54) 31(38.1,0) 32(38.1,2.54) 33(40.64,0) 34(40.64,2.54) 35(43.18,0) 36(43.18,2.54) 37(45.72,0) 38(45.72,2.54) 39(48.26,0) 40(48.26,2.54) 41(50.8,0) 42(50.8,2.54) 43(53.34,0) 44(53.34,2.54) 45(55.88,0) 46(55.88,2.54) 47(58.42,0) 48(58.42,2.54) 49(60.96,0) 50(60.96,2.54) 51(63.5,0) 52(63.5,2.54) 53(66.04,0) 54(66.04,2.54) 55(68.58,0) 56(68.58,2.54) 57(71.12,0) 58(71.12,2.54) 59(73.66,0) 60(73.66,2.54) 61(76.2,0) 62(76.2,2.54) 63(78.74,0) 64(78.74,2.54) 65(81.28,0) 66(81.28,2.54) 67(83.82,0) 68(83.82,2.54)
Top Overlay:
  drawing of 239 lines, arcs and shapes, not listed
3D body "PIN.STEP": height 8.43, standoff -2.49, extent 82.55,-1.27 85.09,1.27
3D body "PIN.STEP": height 8.43, standoff -2.49, extent 82.55,1.27 85.09,3.81
3D body "PIN.STEP": height 8.43, standoff -2.49, extent -1.27,1.27 1.27,3.81
3D body "PIN_mid.STEP": height 8.43, standoff -2.49, extent 80.01,-1.27 82.55,1.27
3D body "PIN_mid.STEP": height 8.43, standoff -2.49, extent 77.47,-1.27 80.01,1.27
3D body "PIN_mid.STEP": height 8.43, standoff -2.49, extent 74.93,-1.27 77.47,1.27
3D body "PIN_mid.STEP": height 8.43, standoff -2.49, extent 72.39,-1.27 74.93,1.27
3D body "PIN_mid.STEP": height 8.43, standoff -2.49, extent 69.85,-1.27 72.39,1.27
3D body "PIN_mid.STEP": height 8.43, standoff -2.49, extent 67.31,-1.27 69.85,1.27
3D body "PIN_mid.STEP": height 8.43, standoff -2.49, extent 64.77,-1.27 67.31,1.27
3D body "PIN_mid.STEP": height 8.43, standoff -2.49, extent 62.23,-1.27 64.77,1.27
3D body "PIN_mid.STEP": height 8.43, standoff -2.49, extent 59.69,-1.27 62.23,1.27
3D body "PIN_mid.STEP": height 8.43, standoff -2.49, extent 57.15,-1.27 59.69,1.27
3D body "PIN_mid.STEP": height 8.43, standoff -2.49, extent 54.61,-1.27 57.15,1.27
3D body "PIN_mid.STEP": height 8.43, standoff -2.49, extent 52.07,-1.27 54.61,1.27
3D body "PIN_mid.STEP": height 8.43, standoff -2.49, extent 49.53,-1.27 52.07,1.27
3D body "PIN_mid.STEP": height 8.43, standoff -2.49, extent 46.99,-1.27 49.53,1.27
3D body "PIN_mid.STEP": height 8.43, standoff -2.49, extent 44.45,-1.27 46.99,1.27
3D body "PIN_mid.STEP": height 8.43, standoff -2.49, extent 41.91,-1.27 44.45,1.27
3D body "PIN_mid.STEP": height 8.43, standoff -2.49, extent 39.37,-1.27 41.91,1.27
3D body "PIN_mid.STEP": height 8.43, standoff -2.49, extent 36.83,-1.27 39.37,1.27
3D body "PIN_mid.STEP": height 8.43, standoff -2.49, extent 34.29,-1.27 36.83,1.27
3D body "PIN_mid.STEP": height 8.43, standoff -2.49, extent 31.75,-1.27 34.29,1.27
3D body "PIN_mid.STEP": height 8.43, standoff -2.49, extent 29.21,-1.27 31.75,1.27
3D body "PIN_mid.STEP": height 8.43, standoff -2.49, extent 26.67,-1.27 29.21,1.27
3D body "PIN_mid.STEP": height 8.43, standoff -2.49, extent 24.13,-1.27 26.67,1.27
3D body "PIN_mid.STEP": height 8.43, standoff -2.49, extent 21.59,-1.27 24.13,1.27
3D body "PIN_mid.STEP": height 8.43, standoff -2.49, extent 19.05,-1.27 21.59,1.27
3D body "PIN_mid.STEP": height 8.43, standoff -2.49, extent 16.51,-1.27 19.05,1.27
3D body "PIN_mid.STEP": height 8.43, standoff -2.49, extent 13.97,-1.27 16.51,1.27
3D body "PIN_mid.STEP": height 8.43, standoff -2.49, extent 11.43,-1.27 13.97,1.27
3D body "PIN_mid.STEP": height 8.43, standoff -2.49, extent 8.89,-1.27 11.43,1.27
3D body "PIN_mid.STEP": height 8.43, standoff -2.49, extent 6.35,-1.27 8.89,1.27
3D body "PIN_mid.STEP": height 8.43, standoff -2.49, extent 3.81,-1.27 6.35,1.27
3D body "PIN_mid.STEP": height 8.43, standoff -2.49, extent 1.27,-1.27 3.81,1.27
3D body "PIN_mid.STEP": height 8.43, standoff -2.49, extent 1.27,1.27 3.81,3.81
3D body "PIN_mid.STEP": height 8.43, standoff -2.49, extent 80.01,1.27 82.55,3.81
3D body "PIN_mid.STEP": height 8.43, standoff -2.49, extent 77.47,1.27 80.01,3.81
3D body "PIN_mid.STEP": height 8.43, standoff -2.49, extent 74.93,1.27 77.47,3.81
3D body "PIN_mid.STEP": height 8.43, standoff -2.49, extent 72.39,1.27 74.93,3.81
3D body "PIN_mid.STEP": height 8.43, standoff -2.49, extent 69.85,1.27 72.39,3.81
3D body "PIN_mid.STEP": height 8.43, standoff -2.49, extent 67.31,1.27 69.85,3.81
3D body "PIN_mid.STEP": height 8.43, standoff -2.49, extent 64.77,1.27 67.31,3.81
3D body "PIN_mid.STEP": height 8.43, standoff -2.49, extent 62.23,1.27 64.77,3.81
3D body "PIN_mid.STEP": height 8.43, standoff -2.49, extent 59.69,1.27 62.23,3.81
3D body "PIN_mid.STEP": height 8.43, standoff -2.49, extent 57.15,1.27 59.69,3.81
3D body "PIN_mid.STEP": height 8.43, standoff -2.49, extent 54.61,1.27 57.15,3.81
3D body "PIN_mid.STEP": height 8.43, standoff -2.49, extent 52.07,1.27 54.61,3.81
3D body "PIN_mid.STEP": height 8.43, standoff -2.49, extent 49.53,1.27 52.07,3.81
3D body "PIN_mid.STEP": height 8.43, standoff -2.49, extent 46.99,1.27 49.53,3.81
3D body "PIN_mid.STEP": height 8.43, standoff -2.49, extent 44.45,1.27 46.99,3.81
3D body "PIN_mid.STEP": height 8.43, standoff -2.49, extent 41.91,1.27 44.45,3.81
3D body "PIN_mid.STEP": height 8.43, standoff -2.49, extent 39.37,1.27 41.91,3.81
3D body "PIN_mid.STEP": height 8.43, standoff -2.49, extent 36.83,1.27 39.37,3.81
3D body "PIN_mid.STEP": height 8.43, standoff -2.49, extent 34.29,1.27 36.83,3.81
3D body "PIN_mid.STEP": height 8.43, standoff -2.49, extent 31.75,1.27 34.29,3.81
3D body "PIN_mid.STEP": height 8.43, standoff -2.49, extent 29.21,1.27 31.75,3.81
3D body "PIN_mid.STEP": height 8.43, standoff -2.49, extent 26.67,1.27 29.21,3.81
3D body "PIN_mid.STEP": height 8.43, standoff -2.49, extent 24.13,1.27 26.67,3.81
3D body "PIN_mid.STEP": height 8.43, standoff -2.49, extent 21.59,1.27 24.13,3.81
3D body "PIN_mid.STEP": height 8.43, standoff -2.49, extent 19.05,1.27 21.59,3.81
3D body "PIN_mid.STEP": height 8.43, standoff -2.49, extent 16.51,1.27 19.05,3.81
3D body "PIN_mid.STEP": height 8.43, standoff -2.49, extent 13.97,1.27 16.51,3.81
3D body "PIN_mid.STEP": height 8.43, standoff -2.49, extent 11.43,1.27 13.97,3.81
3D body "PIN_mid.STEP": height 8.43, standoff -2.49, extent 8.89,1.27 11.43,3.81
3D body "PIN_mid.STEP": height 8.43, standoff -2.49, extent 6.35,1.27 8.89,3.81
3D body "PIN_mid.STEP": height 8.43, standoff -2.49, extent 3.81,1.27 6.35,3.81
3D body "PIN.STEP": height 8.43, standoff -2.49, extent -1.27,-1.27 1.27,1.27

## MHDR2X35-254P [mm] "Male Header 2X35 with 2.54 mm Pitch"
pads (70):
  rect 1.5x1.5 hole 0.9: 1(0,0)
  round 1.5 hole 0.9: 2(0,2.54) 3(2.54,0) 4(2.54,2.54) 5(5.08,0) 6(5.08,2.54) 7(7.62,0) 8(7.62,2.54) 9(10.16,0) 10(10.16,2.54) 11(12.7,0) 12(12.7,2.54) 13(15.24,0) 14(15.24,2.54) 15(17.78,0) 16(17.78,2.54) 17(20.32,0) 18(20.32,2.54) 19(22.86,0) 20(22.86,2.54) 21(25.4,0) 22(25.4,2.54) 23(27.94,0) 24(27.94,2.54) 25(30.48,0) 26(30.48,2.54) 27(33.02,0) 28(33.02,2.54) 29(35.56,0) 30(35.56,2.54) 31(38.1,0) 32(38.1,2.54) 33(40.64,0) 34(40.64,2.54) 35(43.18,0) 36(43.18,2.54) 37(45.72,0) 38(45.72,2.54) 39(48.26,0) 40(48.26,2.54) 41(50.8,0) 42(50.8,2.54) 43(53.34,0) 44(53.34,2.54) 45(55.88,0) 46(55.88,2.54) 47(58.42,0) 48(58.42,2.54) 49(60.96,0) 50(60.96,2.54) 51(63.5,0) 52(63.5,2.54) 53(66.04,0) 54(66.04,2.54) 55(68.58,0) 56(68.58,2.54) 57(71.12,0) 58(71.12,2.54) 59(73.66,0) 60(73.66,2.54) 61(76.2,0) 62(76.2,2.54) 63(78.74,0) 64(78.74,2.54) 65(81.28,0) 66(81.28,2.54) 67(83.82,0) 68(83.82,2.54) 69(86.36,0) 70(86.36,2.54)
Top Overlay:
  drawing of 246 lines, arcs and shapes, not listed
  text "1" at 0.508,-1.983 h1
  text "2" at 0.508,4.318 h1
  text "2" at 0.508,4.318 h1
  text "1" at 0.508,-1.983 h1
  text "4" at 3.048,4.318 h1
  text "3" at 3.048,-2.412 h1
  text "6" at 5.588,4.318 h1
  text "5" at 5.588,-2.412 h1
  text "8" at 8.128,4.318 h1
  text "7" at 8.128,-2.412 h1
  text "10" at 10.668,4.318 h1
  text "9" at 10.668,-2.364 h1
  text "12" at 13.208,4.318 h1
  text "11" at 13.208,-2.716 h1
  text "14" at 15.748,4.318 h1
  text "13" at 15.748,-3.145 h1
  text "16" at 18.288,4.318 h1
  text "15" at 18.288,-3.145 h1
  text "18" at 20.828,4.318 h1
  text "17" at 20.828,-3.145 h1
  text "20" at 23.368,4.318 h1
  text "19" at 23.368,-3.097 h1
  text "22" at 25.908,4.318 h1
  text "21" at 25.908,-2.874 h1
  text "24" at 28.448,4.318 h1
  text "23" at 28.448,-3.302 h1
  text "26" at 30.988,4.318 h1
  text "25" at 30.988,-3.302 h1
  text "28" at 33.528,4.318 h1
  text "27" at 33.528,-3.302 h1
  text "30" at 36.068,4.318 h1
  text "29" at 36.068,-3.254 h1
  text "32" at 38.608,4.318 h1
  text "31" at 38.608,-2.874 h1
  text "34" at 41.148,4.318 h1
  text "33" at 41.148,-3.302 h1
  text "36" at 43.688,4.318 h1
  text "35" at 43.688,-3.302 h1
  text "38" at 46.228,4.318 h1
  text "37" at 46.228,-3.302 h1
  text "40" at 48.768,4.318 h1
  text "39" at 48.768,-3.254 h1
  text "42" at 51.308,4.318 h1
  text "41" at 51.308,-2.874 h1
  text "44" at 53.848,4.318 h1
  text "43" at 53.848,-3.302 h1
  text "46" at 56.388,4.318 h1
  text "45" at 56.388,-3.302 h1
  text "48" at 58.928,4.318 h1
  text "47" at 58.928,-3.302 h1
  text "50" at 61.468,4.318 h1
  text "49" at 61.468,-3.254 h1
  text "52" at 64.008,4.318 h1
  text "51" at 64.008,-2.874 h1
  text "54" at 66.548,4.318 h1
  text "53" at 66.548,-3.302 h1
  text "56" at 69.088,4.318 h1
  text "55" at 69.088,-3.302 h1
  text "58" at 71.628,4.318 h1
  text "57" at 71.628,-3.302 h1
  text "60" at 74.168,4.318 h1
  text "59" at 74.168,-3.254 h1
  text "62" at 76.708,4.318 h1
  text "61" at 76.708,-2.821 h1
  text "64" at 79.248,4.318 h1
  text "63" at 79.248,-3.25 h1
  text "66" at 81.788,4.318 h1
  text "65" at 81.788,-3.25 h1
  text "68" at 84.328,4.318 h1
  text "67" at 84.328,-3.25 h1
  text "70" at 86.868,4.318 h1
  text "69" at 86.868,-3.202 h1
3D body "PIN.STEP": height 8.43, standoff -2.49, extent 85.09,-1.27 87.63,1.27
3D body "PIN.STEP": height 8.43, standoff -2.49, extent 85.09,1.27 87.63,3.81
3D body "PIN.STEP": height 8.43, standoff -2.49, extent -1.27,1.27 1.27,3.81
3D body "PIN_mid.STEP": height 8.43, standoff -2.49, extent 82.55,-1.27 85.09,1.27
3D body "PIN_mid.STEP": height 8.43, standoff -2.49, extent 80.01,-1.27 82.55,1.27
3D body "PIN_mid.STEP": height 8.43, standoff -2.49, extent 77.47,-1.27 80.01,1.27
3D body "PIN_mid.STEP": height 8.43, standoff -2.49, extent 74.93,-1.27 77.47,1.27
3D body "PIN_mid.STEP": height 8.43, standoff -2.49, extent 72.39,-1.27 74.93,1.27
3D body "PIN_mid.STEP": height 8.43, standoff -2.49, extent 69.85,-1.27 72.39,1.27
3D body "PIN_mid.STEP": height 8.43, standoff -2.49, extent 67.31,-1.27 69.85,1.27
3D body "PIN_mid.STEP": height 8.43, standoff -2.49, extent 64.77,-1.27 67.31,1.27
3D body "PIN_mid.STEP": height 8.43, standoff -2.49, extent 62.23,-1.27 64.77,1.27
3D body "PIN_mid.STEP": height 8.43, standoff -2.49, extent 59.69,-1.27 62.23,1.27
3D body "PIN_mid.STEP": height 8.43, standoff -2.49, extent 57.15,-1.27 59.69,1.27
3D body "PIN_mid.STEP": height 8.43, standoff -2.49, extent 54.61,-1.27 57.15,1.27
3D body "PIN_mid.STEP": height 8.43, standoff -2.49, extent 52.07,-1.27 54.61,1.27
3D body "PIN_mid.STEP": height 8.43, standoff -2.49, extent 49.53,-1.27 52.07,1.27
3D body "PIN_mid.STEP": height 8.43, standoff -2.49, extent 46.99,-1.27 49.53,1.27
3D body "PIN_mid.STEP": height 8.43, standoff -2.49, extent 44.45,-1.27 46.99,1.27
3D body "PIN_mid.STEP": height 8.43, standoff -2.49, extent 41.91,-1.27 44.45,1.27
3D body "PIN_mid.STEP": height 8.43, standoff -2.49, extent 39.37,-1.27 41.91,1.27
3D body "PIN_mid.STEP": height 8.43, standoff -2.49, extent 36.83,-1.27 39.37,1.27
3D body "PIN_mid.STEP": height 8.43, standoff -2.49, extent 34.29,-1.27 36.83,1.27
3D body "PIN_mid.STEP": height 8.43, standoff -2.49, extent 31.75,-1.27 34.29,1.27
3D body "PIN_mid.STEP": height 8.43, standoff -2.49, extent 29.21,-1.27 31.75,1.27
3D body "PIN_mid.STEP": height 8.43, standoff -2.49, extent 26.67,-1.27 29.21,1.27
3D body "PIN_mid.STEP": height 8.43, standoff -2.49, extent 24.13,-1.27 26.67,1.27
3D body "PIN_mid.STEP": height 8.43, standoff -2.49, extent 21.59,-1.27 24.13,1.27
3D body "PIN_mid.STEP": height 8.43, standoff -2.49, extent 19.05,-1.27 21.59,1.27
3D body "PIN_mid.STEP": height 8.43, standoff -2.49, extent 16.51,-1.27 19.05,1.27
3D body "PIN_mid.STEP": height 8.43, standoff -2.49, extent 13.97,-1.27 16.51,1.27
3D body "PIN_mid.STEP": height 8.43, standoff -2.49, extent 11.43,-1.27 13.97,1.27
3D body "PIN_mid.STEP": height 8.43, standoff -2.49, extent 8.89,-1.27 11.43,1.27
3D body "PIN_mid.STEP": height 8.43, standoff -2.49, extent 6.35,-1.27 8.89,1.27
3D body "PIN_mid.STEP": height 8.43, standoff -2.49, extent 3.81,-1.27 6.35,1.27
3D body "PIN_mid.STEP": height 8.43, standoff -2.49, extent 1.27,-1.27 3.81,1.27
3D body "PIN_mid.STEP": height 8.43, standoff -2.49, extent 1.27,1.27 3.81,3.81
3D body "PIN_mid.STEP": height 8.43, standoff -2.49, extent 82.55,1.27 85.09,3.81
3D body "PIN_mid.STEP": height 8.43, standoff -2.49, extent 80.01,1.27 82.55,3.81
3D body "PIN_mid.STEP": height 8.43, standoff -2.49, extent 77.47,1.27 80.01,3.81
3D body "PIN_mid.STEP": height 8.43, standoff -2.49, extent 74.93,1.27 77.47,3.81
3D body "PIN_mid.STEP": height 8.43, standoff -2.49, extent 72.39,1.27 74.93,3.81
3D body "PIN_mid.STEP": height 8.43, standoff -2.49, extent 69.85,1.27 72.39,3.81
3D body "PIN_mid.STEP": height 8.43, standoff -2.49, extent 67.31,1.27 69.85,3.81
3D body "PIN_mid.STEP": height 8.43, standoff -2.49, extent 64.77,1.27 67.31,3.81
3D body "PIN_mid.STEP": height 8.43, standoff -2.49, extent 62.23,1.27 64.77,3.81
3D body "PIN_mid.STEP": height 8.43, standoff -2.49, extent 59.69,1.27 62.23,3.81
3D body "PIN_mid.STEP": height 8.43, standoff -2.49, extent 57.15,1.27 59.69,3.81
3D body "PIN_mid.STEP": height 8.43, standoff -2.49, extent 54.61,1.27 57.15,3.81
3D body "PIN_mid.STEP": height 8.43, standoff -2.49, extent 52.07,1.27 54.61,3.81
3D body "PIN_mid.STEP": height 8.43, standoff -2.49, extent 49.53,1.27 52.07,3.81
3D body "PIN_mid.STEP": height 8.43, standoff -2.49, extent 46.99,1.27 49.53,3.81
3D body "PIN_mid.STEP": height 8.43, standoff -2.49, extent 44.45,1.27 46.99,3.81
3D body "PIN_mid.STEP": height 8.43, standoff -2.49, extent 41.91,1.27 44.45,3.81
3D body "PIN_mid.STEP": height 8.43, standoff -2.49, extent 39.37,1.27 41.91,3.81
3D body "PIN_mid.STEP": height 8.43, standoff -2.49, extent 36.83,1.27 39.37,3.81
3D body "PIN_mid.STEP": height 8.43, standoff -2.49, extent 34.29,1.27 36.83,3.81
3D body "PIN_mid.STEP": height 8.43, standoff -2.49, extent 31.75,1.27 34.29,3.81
3D body "PIN_mid.STEP": height 8.43, standoff -2.49, extent 29.21,1.27 31.75,3.81
3D body "PIN_mid.STEP": height 8.43, standoff -2.49, extent 26.67,1.27 29.21,3.81
3D body "PIN_mid.STEP": height 8.43, standoff -2.49, extent 24.13,1.27 26.67,3.81
3D body "PIN_mid.STEP": height 8.43, standoff -2.49, extent 21.59,1.27 24.13,3.81
3D body "PIN_mid.STEP": height 8.43, standoff -2.49, extent 19.05,1.27 21.59,3.81
3D body "PIN_mid.STEP": height 8.43, standoff -2.49, extent 16.51,1.27 19.05,3.81
3D body "PIN_mid.STEP": height 8.43, standoff -2.49, extent 13.97,1.27 16.51,3.81
3D body "PIN_mid.STEP": height 8.43, standoff -2.49, extent 11.43,1.27 13.97,3.81
3D body "PIN_mid.STEP": height 8.43, standoff -2.49, extent 8.89,1.27 11.43,3.81
3D body "PIN_mid.STEP": height 8.43, standoff -2.49, extent 6.35,1.27 8.89,3.81
3D body "PIN_mid.STEP": height 8.43, standoff -2.49, extent 3.81,1.27 6.35,3.81
3D body "PIN.STEP": height 8.43, standoff -2.49, extent -1.27,-1.27 1.27,1.27